# Altium schematic symbol library Water Tank Telemeter.SchLib: 63 symbols
Pins are listed as number, name and electrical type; pins without a type are passive.

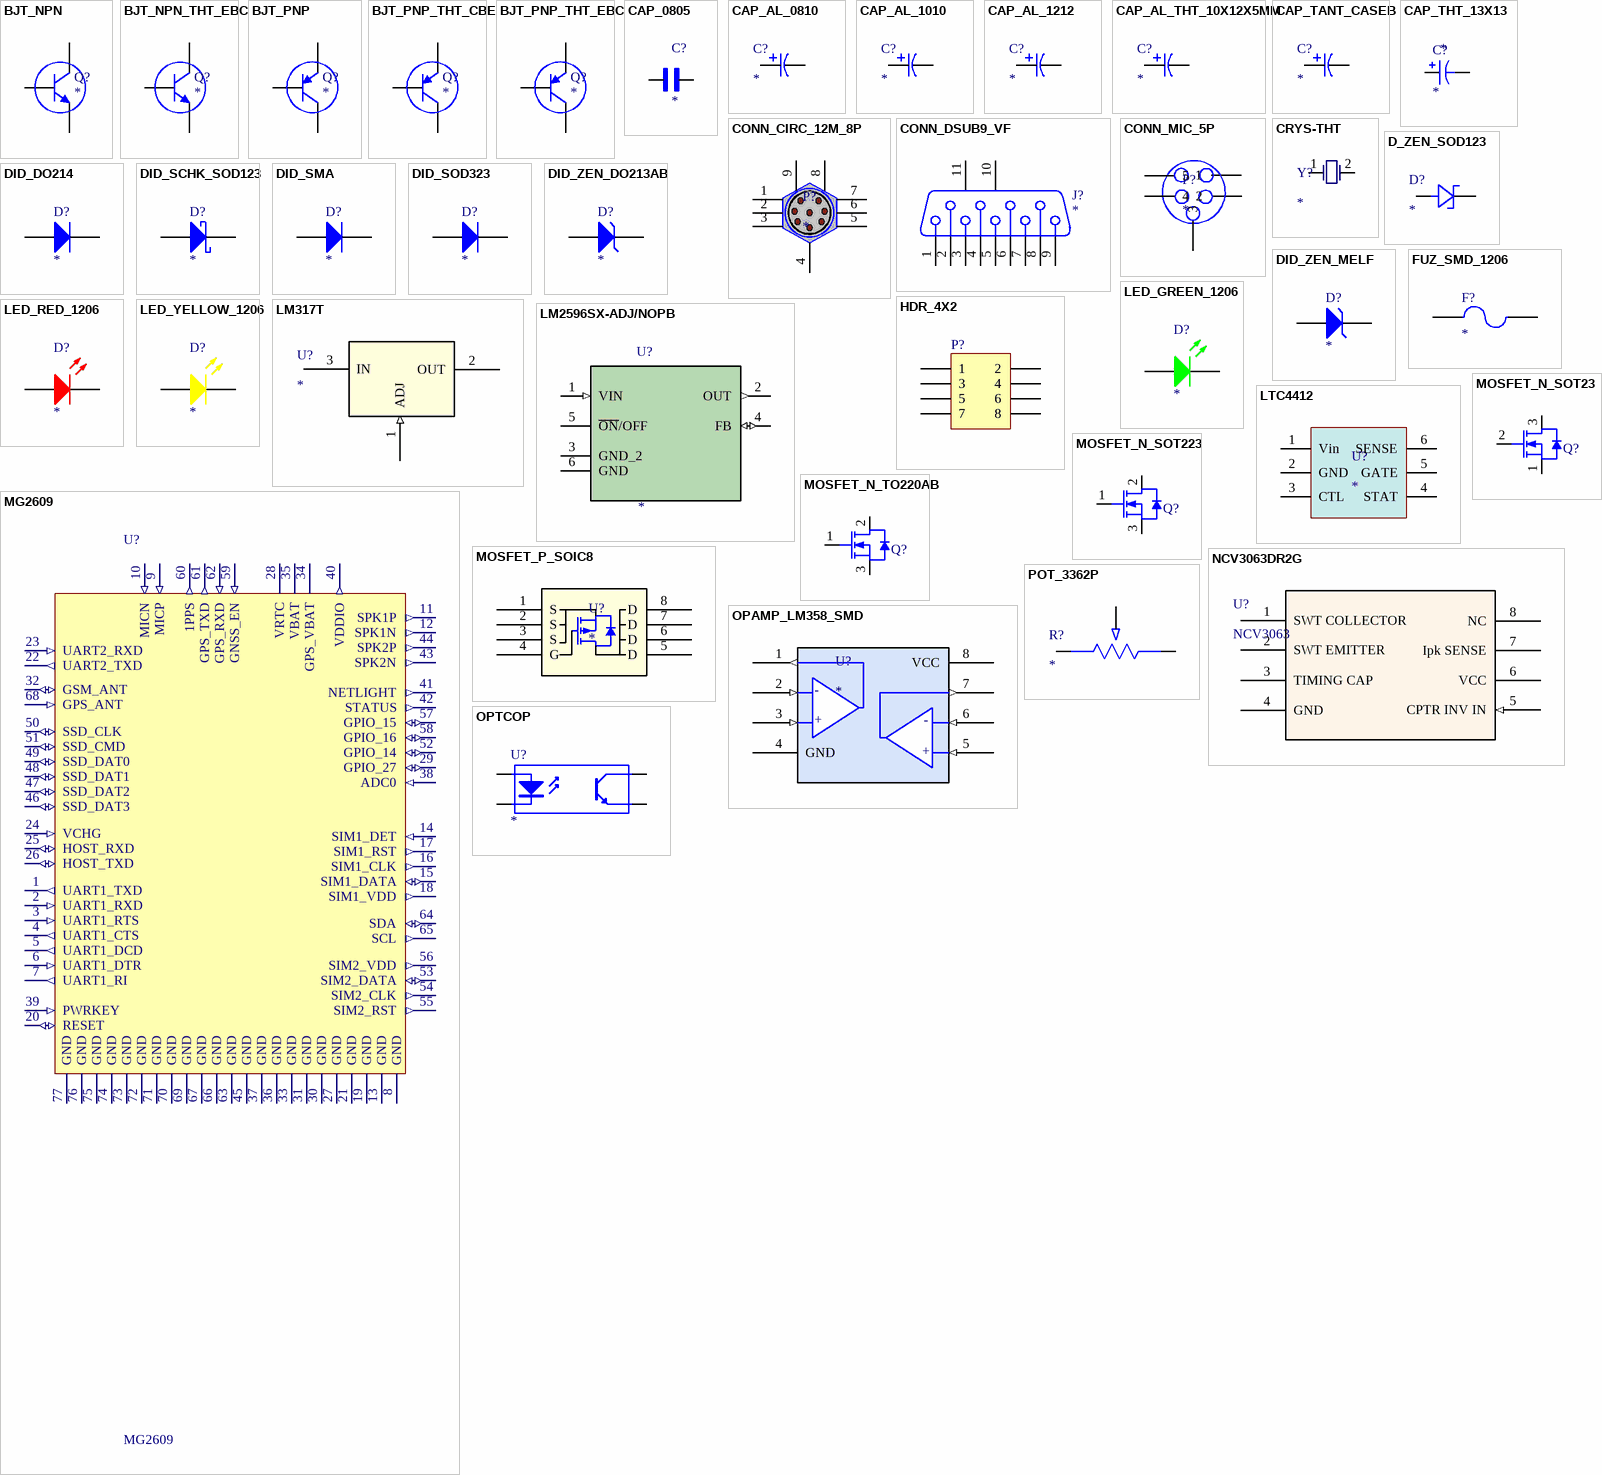
[diagram p0: symbols BJT_NPN to POT_3362P]

## BJT_NPN
designator Q?
=Product Description; Product Name: *; Product Description: *; Package: SOT23; Value: *
footprint SOT-23 - CC
pins: 1 B, 2 E, 3 C

## BJT_NPN_THT_EBC
designator Q?
=Product Description; Product Name: *; Product Description: *; Package: TO92; Value: *
footprint TO-92
pins: 1 E, 2 B, 3 C

## BJT_PNP
designator Q?
=Product Description; Product Name: *; Product Description: *; Package: SOT23; Value: *
footprint SOT-23 - CC
pins: 1 B, 2 C, 3 E

## BJT_PNP_THT_CBE
designator Q?
=Product Description; Product Name: *; Product Description: *; Package: TO-92; Value: *
footprint TO-92
pins: 1 C, 2 B, 3 E

## BJT_PNP_THT_EBC
designator Q?
=Product Description; Product Name: *; Product Description: *; Package: TO-92; Value: *
footprint TO-92
pins: 1 E, 2 B, 3 C

## CAP_0805
designator C?
=Product Description; Product Name: *; Package: 0805; Product Description: *; Value: *
footprint CAP_0805
pins: 1, 2

## CAP_AL_0810
designator C?
=Product Description; Product Name: *; Product Description: *; Value: *; Manufacturer: *
footprint CAP_AL_0810
pins: 1, 2

## CAP_AL_1010
designator C?
=Product Description; Product Name: *; Product Description: *; Value: *; Dimensions (mm) DxL: 10.00x10.00
footprint CAP_Al_1010
pins: 1, 2

## CAP_AL_1212
designator C?
=Product Description; Product Name: *; Product Description: *; Value: *; Dimensions (mm) DxL: 12.5X12.5
footprint CAP_AL_12d5X12d5
pins: 1, 2

## CAP_AL_THT_10X12X5MM
designator C?
=Product Description; Product Name: *; Product Description: *; Value: *; Manufacturer: *
footprint CAP_AL_THT_10X20X5MM
pins: 1, 2

## CAP_TANT_CASEB
designator C?
=Product Descriptipn; Product Name: *; Product Description: *; Value: *; Case Dimension (mm) LxWxH: *
footprint CAP_TANT_CASEB
pins: 1, 2

## CAP_THT_13X13
designator C?
=Product Description; Product Name: *; Product Description: *; Package: 13mm; Value: *
footprint CAP_AL_13 X 13
pins: 1 K, 2 A
1 alternate drawing of the same symbol

## CONN_CIRC_12M_8P
designator P?
=Product Description; Product Name: *; Product Description: *; Value: *
footprint CONN_CIRC_12M_8P
pins: 1, 2, 3, 4, 5, 6, 7, 8, 9

## CONN_DSUB9_VF
designator J?
=Product Description; Product Name: *; Product Description: *; Manufacturer: *; Value: *
footprint DSUB9_VF (Connector; D Subminiature; 9 Position; Right Angle; Pitch 1.385 mm)
signal-integrity model Connector
pins: 1, 2, 3, 4, 5, 6, 7, 8, 9, 10 MH1, 11 MH2

## CONN_MIC_5P
designator P?
=Product Description; ComponentLink1URL: https://www.molex.com/pdm_docs/sd/395321002_sd.pdf; ComponentLink1Description: https://www.molex.com/pdm_docs/sd/395321002_sd.pdf; Product Name: *; Product Description: *; Value: *
footprint CONN_MIC_5P
pins: 1, 2, 3, 4, 5

## CRYS-THT
designator Y?
=Product Description; .Checked PCB: .; Value: *; Product Name: *; Product Description: *; Package / Case: *; .Checked SCH: .
footprint CRYS_THT
pins: 1, 2

## D_ZEN_SOD123
designator D?
=Product Description; Product Name: *; Product Description: *; Package / Case: *; Manufacturer: *; Value: *
footprint SOD123
pins: 1, 2

## DID_DO214
designator D?
=Product Description; Product Name: *; Product Description: *; Package: DO214AB; Value: *
footprint DO-214AB
pins: 1 K, 2 A

## DID_SCHK_SOD123
designator D?
=Product Description; Product Name: *; Product Description: *; Package: SOD123; Value: *
footprint SOD123
pins: 1 K, 2 A

## DID_SMA
designator D?
=Product Description; Product Name: *; Product Description: *; Package: SMA; Value: *
footprint DID_SMA
pins: 1 A, 2 K

## DID_SOD323
designator D?
=Product Description; Product Name: *; Product Description: *; Package: DO323; Value: *
footprint SOD_323
pins: 1 K, 2 A

## DID_ZEN_DO213AB
designator D?
=Product Description; Product Name: *; Product Description: *; Package: DO-213AB; Value: *
footprint DO-213AB
pins: 1 K, 2 A

## DID_ZEN_MELF
designator D?
=Product Description; Product Name: *; Product Description: *; Package: MELF; Value: *
footprint MELF
pins: 1 K, 2 A

## FUZ_SMD_1206
designator F?
=Product Description; Product Name: *; Product Description: *; Package: 1206; Value: *
footprint FUS_1206
pins: 1, 2

## HDR_4X2
designator P?
=Product Description; Product Description: Header, 4-Pin, Dual row; LatestRevisionDate: 17-Jul-2002; LatestRevisionNote: Re-released for DXP Platform.; Publisher: Altium Limited
footprint HDR2X4 (Connector; Header; 4x2 Position)
signal-integrity model Connector
pins: 1, 2, 3, 4, 5, 6, 7, 8

## LED_GREEN_1206
designator D?
=Product Description; Product Description: *; Product Name: *; Manufacturer: *; Value: *; Color: *
footprint LED_GREEN_1206
pins: 1 K, 2 A

## LED_RED_1206
designator D?
=Product Description; Product Description: *; Product Name: *; Manufacturer: *; Value: *; Color: *
footprint LED_RED_1206
pins: 1 K, 2 A

## LED_YELLOW_1206
designator D?
=Product Description; Product Description: *; Product Name: *; Manufacturer: *; Value: *; Color: *
footprint LED_YELLOW_1206
pins: 1 K, 2 A

## LM317T
designator U?
=Product Description; Product Name: LM317T-DG; Product Description: IC-317 V.REG/STABILIZER 1.5A TO220 DOUBLE GAUG ST; Value: *; Package: TO220-3
footprint TO-220AB
pins: 1 ADJ (in), 2 OUT (power), 3 IN (power)

## LM2596SX-ADJ/NOPB
designator U?
=Product Description; Manufacturer: Texas Instrument; Product Name: LM2596SX-ADJ/NOPB; Product Description: IC-2596 V.REG.3A TO-263 SMD D2PACK TI; Package / Case: TO263-5 (D2PAK-5); Value: *
footprint TO170P1435X465-6N
pins: 1 VIN (in), 2 OUT (out), 3 GND_2, 4 FB (io), 5 ~{ON}/OFF, 6 GND

## LTC4412
designator U?
=Product Description; .Checked PCB: .; Product Name: *; Product Description: *; Package / Case: *; Value: *; .Checked SCH: .
footprint SOT23-6L
pins: 1 Vin, 2 GND, 3 CTL, 4 STAT, 5 GATE, 6 SENSE

## MG2609
designator U?
=Product Description; Product Name: *; Product Description: *; Manufacturer: *; Package / Case: *; Value: MG2609
footprint LCC_17P6X15P7X2P3
pins: 1 UART1_TXD (out), 2 UART1_RXD (in), 3 UART1_RTS (in), 4 UART1_CTS (out), 5 UART1_DCD (out), 6 UART1_DTR (in), 7 UART1_RI (out), 8 GND (power), 9 MICP (in), 10 MICN (in), 11 SPK1P (out), 12 SPK1N (out), 13 GND (power), 14 SIM1_DET (in), 15 SIM1_DATA (io), 16 SIM1_CLK (out), 17 SIM1_RST (out), 18 SIM1_VDD (out), 19 GND (power), 20 RESET (io), 21 GND (power), 22 UART2_TXD (out), 23 UART2_RXD (in), 24 VCHG (in), 25 HOST_RXD (io), 26 HOST_TXD (io), 27 GND (power), 28 VRTC (power), 29 GPIO_27 (io), 30 GND (power), 31 GND (power), 32 GSM_ANT (io), 33 GND (power), 34 GPS_VBAT (power), 35 VBAT (power), 36 GND (power), 37 GND (power), 38 ADC0 (in), 39 PWRKEY (in), 40 VDDIO (out), 41 NETLIGHT (out), 42 STATUS (out), 43 SPK2N (out), 44 SPK2P (out), 45 GND (power), 46 SSD_DAT3 (io), 47 SSD_DAT2 (io), 48 SSD_DAT1 (io), 49 SSD_DAT0 (io), 50 SSD_CLK (io), 51 SSD_CMD (io), 52 GPIO_14 (io), 53 SIM2_DATA (io), 54 SIM2_CLK (out), 55 SIM2_RST (out), 56 SIM2_VDD (out), 57 GPIO_15 (io), 58 GPIO_16 (io), 59 GNSS_EN (in), 60 1PPS (out), 61 GPS_TXD (out), 62 GPS_RXD (in), 63 GND (power), 64 SDA (io), 65 SCL (out), 66 GND (power), 67 GND (power), 68 GPS_ANT (in), 69 GND (power), 70 GND (power), 71 GND (power), 72 GND (power), 73 GND (power), 74 GND (power), 75 GND (power), 76 GND (power), 77 GND (power)

## MOSFET_N_SOT23
designator Q?  (value not drawn)
=Product Description; Product Name: *; Product Description: *; Package / Case: *; Manufacturer: *; Value: *
footprint SOT-23
pins: 1 S, 2 G, 3 D

## MOSFET_N_SOT223
designator Q?  (value not drawn)
=Product Description; Product Name: *; Product Description: *; Package / Case: *; Manufacturer: *; Value: *
footprint SOT223
pins: 1 G, 2 D, 3 S

## MOSFET_N_TO220AB
designator Q?  (value not drawn)
=Product Description; Product Name: *; Product Description: *; Package / Case: *; Manufacturer: *; Value: *
footprint TO-220AB
pins: 1 G, 2 D, 3 S

## MOSFET_P_SOIC8
designator U?
=Product Description; .Checked SCH: .; Product Name: *; Product Description: *; Package / Case: *; Manufacturer: *; Value: *; .Checked PCB: .
footprint SOIC-8
pins: 1 S, 2 S, 3 S, 4 G, 5 D, 6 D, 7 D, 8 D

## NCV3063DR2G
designator U?, comment NCV3063
=Product Description; Product Name: NCV3063DR2G; Product Description: IC-3063 INV. SWITCHING REGULATORS SOIC8 SMD ONS; Package: SOIC8; Value: NCV3063
footprint SOIC-8
pins: 1 SWT COLLECTOR, 2 SWT EMITTER, 3 TIMING CAP, 4 GND (power), 5 CPTR INV IN (in), 6 VCC (power), 7 Ipk SENSE, 8 NC

## OPAMP_LM358_SMD
designator U?
=Product Description; Product Name: *; Product Description: *; Package: SOIC8; Value: *
footprint SOIC8
pins: 1 1OUT (out), 2 1IN- (in), 3 1IN+ (in), 4 GND (power), 5 2IN+ (in), 6 2IN- (in), 7 2OUT (out), 8 VCC (power)
text: -; +

## OPTCOP
designator U?
=Product Description; Product Name: *; Manufacturer: *; Package: *; Product Description: *; Value: *
footprint SSOP-4
pins: 1 A "Anode", 2 K "Cathode", 3 E "Emitter", 4 C "Collector"

## POT_3362P
designator R?
=Product Description; Product Name: *; Product Description: *; Tolerance: *; Value: *
footprint POT_9d5X9d5
pins: 1, 2, 3

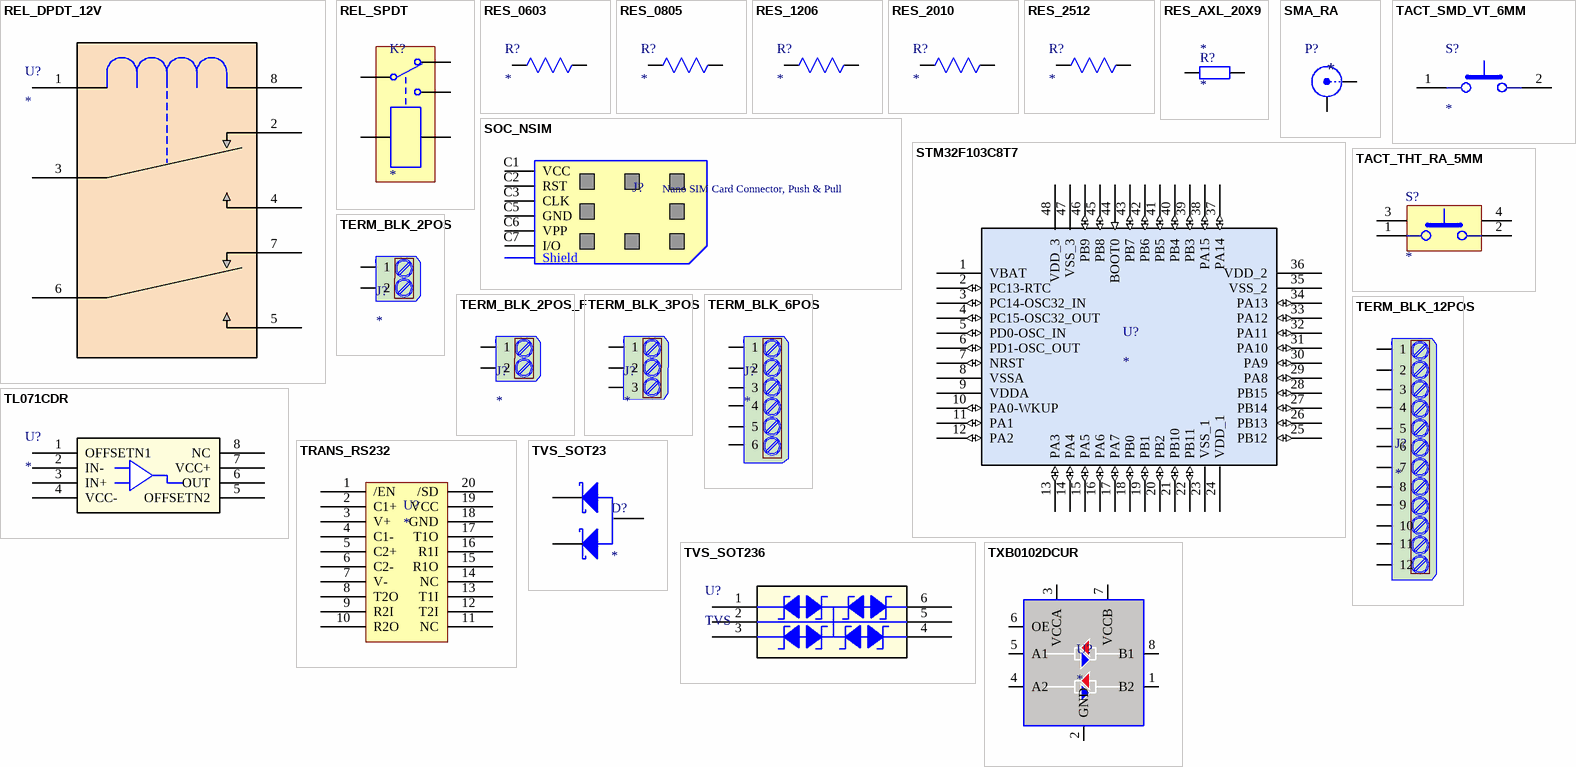
[diagram p1: symbols REL_DPDT_12V to TXB0102DCUR]

## REL_DPDT_12V
designator U?
=Product Description; Contact Form: DPDT; Product Name: *; Product Description: *; Value: *
footprint RELAY_DPDT
pins: 1, 2 5, 3, 4, 5 3, 6, 7 8, 8 2

## REL_SPDT
designator K?
=Product Description; Product Name: *; Product Description: *; Package: SPDT; Value: *
footprint RELAY_SPDT
pins: 1, 2, 3, 4, 5

## RES_0603
designator R?
=Product Description; Product Name: *; Product Description: *; Package / Case: *; Tolerance: *; Watt: *; Value: *
footprint RES_0603
pins: 1, 2

## RES_0805
designator R?
=Product Description; Product Name: *; Package: 0805; Product Description: *; Value: *
footprint RES_0805
pins: 1, 2

## RES_1206
designator R?
=Product Description; Product Name: *; Package: 1206; Product Description: *; Value: *
footprint RES_1206
pins: 1, 2

## RES_2010
designator R?
=Product Description; Product Name: *; Product Description: *; Package: 2010; Value: *
footprint RES_2010
pins: 1, 2

## RES_2512
designator R?
=Product Description; Product Name: *; Product Description: *; Package: 2512; Value: *
footprint RES_2512
pins: 1, 2

## RES_AXL_20X9
designator R?
=Product Description; Product Name: *; Product Description: *; Package: *; Value: *
footprint RES_AXL_22X9
pins: 1, 2

## SMA_RA
designator P?
=Product Description; Product Name: *; Product Description: *; Mounting Type: *; Value: *
footprint CONN_SMA_H
pins: 1, 2

## SOC_NSIM
designator J?, comment Nano SIM Card Connector, Push & Pull
=Product Description; Number of Position: 6; Eject Mechanism: PUSH-PULL; Product Name: *; Product Description: *; Manufacturer: *
footprint SOC_NSIM (Nano SIM Card Connector, Push & Pull)
pins: C1 VCC, C2 RST, C3 CLK, C5 GND, C6 VPP, C7 I/O, Shield

## STM32F103C8T7
designator U?
IC-32F103C MCU 32BIT 64KB FLASH 48LQFP; Product Name: STM32F103C8T7TR; Link: https://www.ozdisan.com/integrated-circuits-ics/embedded-ics/microcontrollers/STM32F103C8T7TR
footprint LQFP-48
pins: 1 VBAT (power), 2 PC13-RTC (io), 3 PC14-OSC32_IN (io), 4 PC15-OSC32_OUT (io), 5 PD0-OSC_IN (io), 6 PD1-OSC_OUT (io), 7 NRST (io), 8 VSSA (power), 9 VDDA (power), 10 PA0-WKUP (io), 11 PA1 (io), 12 PA2 (io), 13 PA3 (io), 14 PA4 (io), 15 PA5 (io), 16 PA6 (io), 17 PA7 (io), 18 PB0 (io), 19 PB1 (io), 20 PB2 (io), 21 PB10 (io), 22 PB11 (io), 23 VSS_1 (power), 24 VDD_1 (power), 25 PB12 (io), 26 PB13 (io), 27 PB14 (io), 28 PB15 (io), 29 PA8 (io), 30 PA9 (io), 31 PA10 (io), 32 PA11 (io), 33 PA12 (io), 34 PA13 (io), 35 VSS_2 (power), 36 VDD_2 (power), 37 PA14 (io), 38 PA15 (io), 39 PB3 (io), 40 PB4 (io), 41 PB5 (io), 42 PB6 (io), 43 PB7 (io), 44 BOOT0 (in), 45 PB8 (io), 46 PB9 (io), 47 VSS_3 (power), 48 VDD_3 (power)

## TACT_SMD_VT_6MM
designator S?
=Product Description; .Checked PCB: *; .Checked SCH: *; Product Name: *; Product Description: *; Outline: *; Value: *
footprint TAC_0603_VT
pins: 1, 2

## TACT_THT_RA_5MM
designator S?
=Product Description; .Checked PCB: *; .Checked SCH: *; Product Name: *; Product Description: *; Outline: *; Value: *
footprint TACT_THT_RA
pins: 1, 2, 3 MECH1, 4 MECH2

## TERM_BLK_2POS
designator J?
=Product Description; ComponentLink1URL: https://www.molex.com/pdm_docs/sd/395321002_sd.pdf; ComponentLink1Description: https://www.molex.com/pdm_docs/sd/395321002_sd.pdf; Product Name: *; Product Description: *; Value: *
footprint TERM_BLK_2P
pins: 1, 2

## TERM_BLK_2POS_F
designator J?
=Product Description; ComponentLink1URL: *; ComponentLink1Description: *; Product Name: *; Product Description: *; Value: *
footprint TERM_BLK_2P_F
pins: 1, 2

## TERM_BLK_3POS
designator J?
=Product Description; ComponentLink1URL: https://www.molex.com/pdm_docs/sd/395321002_sd.pdf; ComponentLink1Description: https://www.molex.com/pdm_docs/sd/395321002_sd.pdf; Product Name: *; Product Description: *; Value: *
footprint TERM_BLK_3P
pins: 1, 2, 3

## TERM_BLK_6POS
designator J?
=Product Description; ComponentLink1URL: https://www.molex.com/pdm_docs/sd/395321002_sd.pdf; ComponentLink1Description: https://www.molex.com/pdm_docs/sd/395321002_sd.pdf; Product Name: *; Product Description: *; Value: *
footprint TERM_BLK_6P
pins: 1, 2, 3, 4, 5, 6

## TERM_BLK_12POS
designator J?
=Product Description; Product Name: GT301-5.0-12P-12-00AH; Product Description: TERM.BLK.5.00MM 12P PCB TYPE; ComponentLink1URL: https://www.molex.com/pdm_docs/sd/395321002_sd.pdf; ComponentLink1Description: https://www.molex.com/pdm_docs/sd/395321002_sd.pdf; Value: *
footprint TERM_BLK_12P
pins: 1, 2, 3, 4, 5, 6, 7, 8, 9, 10, 11, 12

## TL071CDR
designator U?
=Product Description; Product Description: *; Value: *; Product Name: *; Package: *; Manufacturer: *
footprint SOIC-8
pins: 1 OFFSETN1, 2 IN-, 3 IN+, 4 VCC- (power), 5 OFFSETN2, 6 OUT, 7 VCC+ (power), 8 NC

## TRANS_RS232
designator U?
=Product Description; Product Name: ST3222BTR; Product Description: IC-3222 DRIVER/RCVR RS232 LP 20-TSSOP; Package: TSSOP20; Value: *
footprint TSSOP20 (Footprint not found)
pins: 1 /EN, 2 C1+, 3 V+, 4 C1-, 5 C2+, 6 C2-, 7 V-, 8 T2O, 9 R2I, 10 R2O, 11 NC, 12 T2I, 13 T1I, 14 NC, 15 R1O, 16 R1I, 17 T1O, 18 GND, 19 VCC, 20 /SD

## TVS_SOT23
designator D?
=Product Description; Product Name: *; Product Description: *; Value: *; Package: SOT23
footprint SOT-23
pins: 1, 2, 3

## TVS_SOT236
designator U?, comment TVS
=Product Description; Product Name: *; Product Description: *; Manufacturer: *; Package / Case: SOT23-6
footprint SOT23-6L
pins: 1, 2, 3, 4, 5, 6

## TXB0102DCUR
designator U?
=Product Description; .Checked SCH: .; Value: *; Product Name: *; Product Description: *; Package / Case: *; Manufacturer: *; .Checked PCB: .
footprint VSSOP8
pins: 1 B2, 2 GND, 3 VCCA, 4 A2, 5 A1, 6 OE, 7 VCCB, 8 B1